# Altium footprint library Connector_JST.PcbLib: 1 footprints
Each footprint in its own frame and in the unit in brackets; x right, y up, seen from the top. Pads: shape width x height; smd on the part's side, far side on the other; paste and mask are expansions set on the pad; w line width, h text height; cw(c..) or ccw(c..) is an arc to the next point about the centre after c.
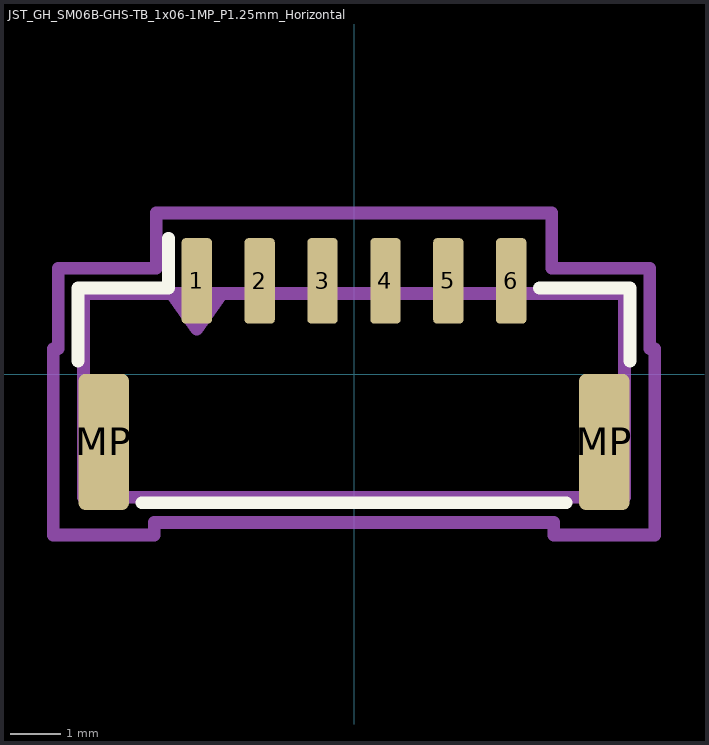
[diagram p0: the footprint, top view; thin cyan lines are the x and y axes]

## JST_GH_SM06B-GHS-TB_1x06-1MP_P1.25mm_Horizontal [mm]
pads (8):
  rrect25% 0.6x1.7 smd: 1(-3.125,1.85) 2(-1.875,1.85) 3(-0.625,1.85) 4(0.625,1.85) 5(1.875,1.85) 6(3.125,1.85)
  rrect25% 1x2.7 smd: MP(-4.975,-1.35) MP(4.975,-1.35)
F.SilkS:
  lines w0.254: -5.485,0.26 -5.485,1.71 -3.685,1.71 -3.685,2.7 ; -4.215,-2.56 4.215,-2.56 ; 3.685,1.71 5.485,1.71 5.485,0.26
F.CrtYd:
  lines w0.254: -5.98,-3.2 -5.98,0.5 -5.88,0.5 -5.88,2.1 -3.93,2.1 -3.93,3.2 3.93,3.2 3.93,2.1 5.88,2.1 5.88,0.5 5.98,0.5 5.98,-3.2 3.97,-3.2 3.97,-2.95 -3.97,-2.95 -3.97,-3.2 -5.98,-3.2
F.Fab:
  lines w0.254: -3.625,1.6 -3.125,0.893 -2.625,1.6 ; -5.375,-2.45 -5.375,1.6 5.375,1.6 5.375,-2.45 -5.375,-2.45
  text "'.Designator'" at -4.047,-0.84 h1